# Altium schematic symbol library PA.SchLib: 2 symbols
Pins are listed as number, name and electrical type; pins without a type are passive.

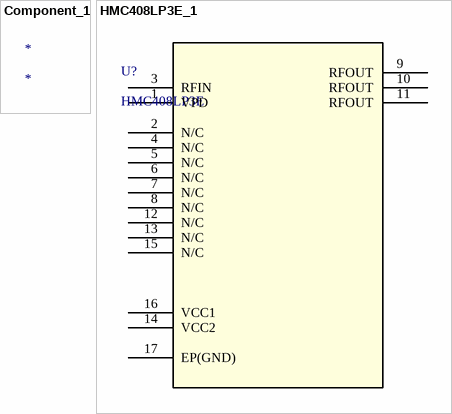
[diagram p0: symbols Component_1 to HMC408LP3E_1]

## Component_1
designator *

## HMC408LP3E_1
designator U?, comment HMC408LP3E
1 Watt Power Amplifier SMT, 5.1 - 5.9 GHz; Manufacturer_Name: Analog Devices Inc; Copyright: Copyright (C) 2026 Ultra Librarian. All rights reserved.; Manufacturer_Part_Number: HMC408LP3E; Datasheet: https://www.analog.com/media/en/technical-documentation/data-sheets/hmc408.pdf; RefDes: RefDes; Type: Type
footprint HCP_16_1_ADI (Footprint not found)
pins: 1 VPD, 2 N/C, 3 RFIN, 4 N/C, 5 N/C, 6 N/C, 7 N/C, 8 N/C, 9 RFOUT, 10 RFOUT, 11 RFOUT, 12 N/C, 13 N/C, 14 VCC2, 15 N/C, 16 VCC1, 17 EP(GND)